# Altium schematic symbol library 150202M153130.SchLib: 1 symbol
Pins are listed as number, name and electrical type; pins without a type are passive.

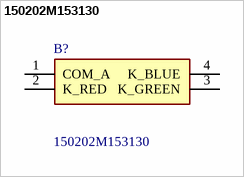
[diagram p0: symbol 150202M153130]

## 150202M153130
designator B?
Red, Green, Blue (RGB) 625nm Red, 520nm Green, 470nm Blue LED Indication - Discrete 2V Red, 3.2V Green, 3.2V Blue 4-SMD, J-Lead; Manufacturer_Name: Wurth Elektronik; Geometry.Height: 2mm; Mouser Part Number: 710-150202M153130; Mouser Price/Stock: https://www.mouser.co.uk/ProductDetail/Wurth-Elektronik/150202M153130?qs=GedFDFLaBXGGSvoPtArHjA%3D%3D; Manufacturer_Part_Number: 150202M153130; Datasheet Link: https://www.we-online.com/components/products/datasheet/150202M153130.pdf
footprint 150202M153130
pins: 1 COM_A, 2 K_RED, 3 K_GREEN, 4 K_BLUE